# Altium schematic symbol library STM32C011F6P6.SchLib: 1 symbol
Pins are listed as number, name and electrical type; pins without a type are passive.

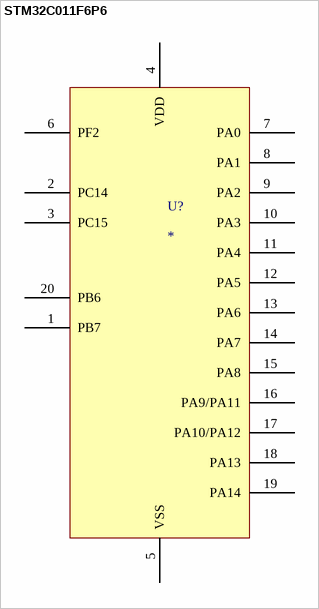
[diagram p0: symbol STM32C011F6P6]

## STM32C011F6P6
designator U?
ARM Microcontrollers - MCU Mainstream Arm Cortex-M0+ MCU 32 Kbytes Flash 6 Kbytes RAM 48 MHz CPU 2x USART / STM32C011F6P6
footprint SOIC65P640X120-20N
pins: 1 PB7, 2 PC14, 3 PC15, 4 VDD, 5 VSS, 6 PF2, 7 PA0, 8 PA1, 9 PA2, 10 PA3, 11 PA4, 12 PA5, 13 PA6, 14 PA7, 15 PA8, 16 PA9/PA11, 17 PA10/PA12, 18 PA13, 19 PA14, 20 PB6